# Altium schematic symbol library Sensor.SchLib: 1 symbol
Pins are listed as number, name and electrical type; pins without a type are passive.

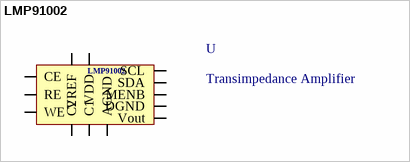
[diagram p0: symbol LMP91002]

## LMP91002
designator U, comment Transimpedance Amplifier
Supplier 1: DigiKey; Supplier Part Number 1: LMP91002SDX/NOPB-ND
footprint SON50P400X400X80-14N; pin to pad 7>7+15
pins: 1 DGND, 2 MENB, 3 SCL, 4 SDA, 6 VDD, 7 AGND, 8 Vout (out), 9 C2, 10 C1, 11 VREF, 12 WE, 13 RE, 14 CE